# Altium footprint library W25Q128JVBIQ.PcbLib: 3 footprints
Each footprint in its own frame and in the unit in brackets; x right, y up, seen from the top. Pads: shape width x height; smd on the part's side, far side on the other; paste and mask are expansions set on the pad; w line width, h text height; cw(c..) or ccw(c..) is an arc to the next point about the centre after c.
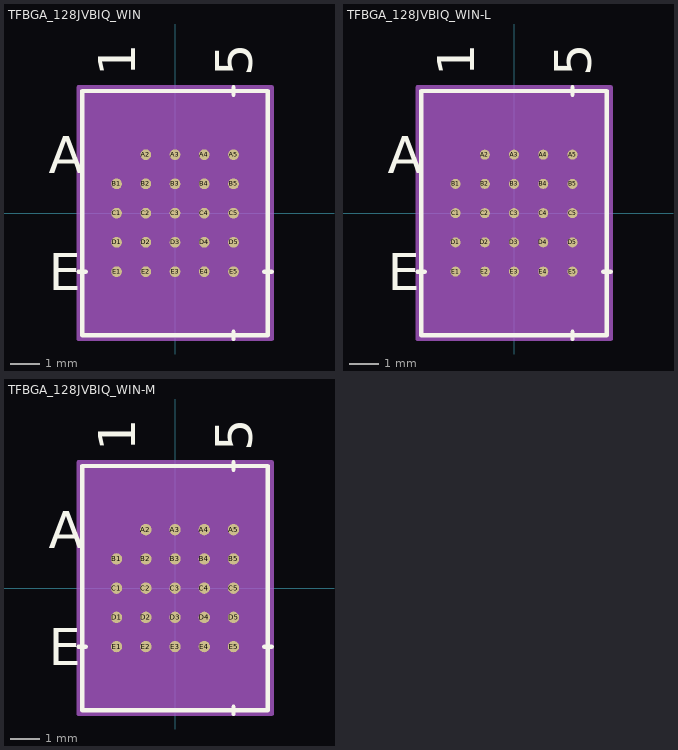
[diagram p0: the footprints below, top view; thin cyan lines are the x and y axes]

## TFBGA_128JVBIQ_WIN [mm]
pads (24):
  round 0.366 smd paste+0 mask+0: A2(-1,2) A3(0,2) A4(1,2) A5(2,2) B1(-2,1) B2(-1,1) B3(0,1) B4(1,1) B5(2,1) C1(-2,0) C2(-1,0) C3(0,0) C4(1,0) C5(2,0) D1(-2,-1) D2(-1,-1) D3(0,-1) D4(1,-1) D5(2,-1) E1(-2,-2) E2(-1,-2) E3(0,-2) E4(1,-2) E5(2,-2)
Top Overlay:
  lines w0.152: -3.302,-2 -3.048,-2 ; 2,-4.305 2,-4.051 ; 2,4.051 2,4.305 ; 3.048,-2 3.302,-2 ; -3.175,-4.178 3.175,-4.178 3.175,4.178 -3.175,4.178 -3.175,-4.178
  text "A" at -4.318,1.365 h1.27
  text "E" at -4.318,-2.635 h1.27
  text "1" at -1.365,4.686 h1.27
  text "5" at 2.635,4.686 h1.27
  text ".Designator" at -3.492,-0.635 h1.27
Bottom Overlay:
  text "A" at -3.683,1.365 h1.27
  text "E" at -3.683,-2.635 h1.27
  text "1" at -2.635,4.686 h1.27
  text "5" at 1.365,4.686 h1.27
Mechanical 13:
  lines w0.025: -3.048,3.551 -2.548,4.051 ; -3.048,-4.051 3.048,-4.051 3.048,4.051 -3.048,4.051 -3.048,-4.051
  text ".Designator" at -3.492,-0.635 h1.27
  text "A" at -4.318,1.365 h1.27
  text "E" at -4.318,-2.635 h1.27
  text "1" at -1.365,4.686 h1.27
  text "5" at 2.635,4.686 h1.27
Mechanical 15:
  region: 3.302,-4.305 -3.302,-4.305 -3.302,4.305 3.302,4.305
  lines w0.152: -3.302,-4.305 -3.302,4.305 3.302,4.305 3.302,-4.305 -3.302,-4.305
3D body "TFBGA_128JVBIQ_WIN.step": height 1.2, standoff 0, extent -3.048,-4.051 3.048,4.051

## TFBGA_128JVBIQ_WIN-L [mil]
pads (24):
  round 13.5 smd paste+0 mask+0: A2(-39.37,78.74) A3(0,78.74) A4(39.37,78.74) A5(78.74,78.74) B1(-78.74,39.37) B2(-39.37,39.37) B3(0,39.37) B4(39.37,39.37) B5(78.74,39.37) C1(-78.74,0) C2(-39.37,0) C3(0,0) C4(39.37,0) C5(78.74,0) D1(-78.74,-39.37) D2(-39.37,-39.37) D3(0,-39.37) D4(39.37,-39.37) D5(78.74,-39.37) E1(-78.74,-78.74) E2(-39.37,-78.74) E3(0,-78.74) E4(39.37,-78.74) E5(78.74,-78.74)
Top Overlay:
  lines w6: -130,-78.74 -120,-78.74 ; 78.74,-169.5 78.74,-159.5 ; 78.74,159.5 78.74,169.5 ; 120,-78.74 130,-78.74 ; -125,-164.5 125,-164.5 125,164.5 -125,164.5 -125,-164.5
  text "A" at -170,53.74 h50
  text "E" at -170,-103.74 h50
  text "1" at -53.74,184.5 h50
  text "5" at 103.74,184.5 h50
  text ".Designator" at -137.5,-25 h50
Bottom Overlay:
  text "A" at -145,53.74 h50
  text "E" at -145,-103.74 h50
  text "1" at -103.74,184.5 h50
  text "5" at 53.74,184.5 h50
Mechanical 13:
  lines w1: -120,139.81 -100.31,159.5 ; -120,-159.5 120,-159.5 120,159.5 -120,159.5 -120,-159.5
  text ".Designator" at -137.5,-25 h50
  text "A" at -170,53.74 h50
  text "E" at -170,-103.74 h50
  text "1" at -53.74,184.5 h50
  text "5" at 103.74,184.5 h50
Mechanical 15:
  region: 130,-169.5 -130,-169.5 -130,169.5 130,169.5
  lines w6: -130,-169.5 -130,169.5 130,169.5 130,-169.5 -130,-169.5
3D body "TFBGA_128JVBIQ_WIN.step": height 47.09, standoff 0.02, extent -120,-159.49 120,159.49

## TFBGA_128JVBIQ_WIN-M [mm]
pads (24):
  round 0.389 smd paste+0 mask+0: A2(-1,2) A3(0,2) A4(1,2) A5(2,2) B1(-2,1) B2(-1,1) B3(0,1) B4(1,1) B5(2,1) C1(-2,0) C2(-1,0) C3(0,0) C4(1,0) C5(2,0) D1(-2,-1) D2(-1,-1) D3(0,-1) D4(1,-1) D5(2,-1) E1(-2,-2) E2(-1,-2) E3(0,-2) E4(1,-2) E5(2,-2)
Top Overlay:
  lines w0.152: -3.302,-2 -3.048,-2 ; 2,-4.305 2,-4.051 ; 2,4.051 2,4.305 ; 3.048,-2 3.302,-2 ; -3.175,-4.178 3.175,-4.178 3.175,4.178 -3.175,4.178 -3.175,-4.178
  text "A" at -4.318,1.365 h1.27
  text "E" at -4.318,-2.635 h1.27
  text "1" at -1.365,4.686 h1.27
  text "5" at 2.635,4.686 h1.27
  text ".Designator" at -3.492,-0.635 h1.27
Bottom Overlay:
  text "A" at -3.683,1.365 h1.27
  text "E" at -3.683,-2.635 h1.27
  text "1" at -2.635,4.686 h1.27
  text "5" at 1.365,4.686 h1.27
Mechanical 13:
  lines w0.025: -3.048,3.551 -2.548,4.051 ; -3.048,-4.051 3.048,-4.051 3.048,4.051 -3.048,4.051 -3.048,-4.051
  text ".Designator" at -3.492,-0.635 h1.27
  text "A" at -4.318,1.365 h1.27
  text "E" at -4.318,-2.635 h1.27
  text "1" at -1.365,4.686 h1.27
  text "5" at 2.635,4.686 h1.27
Mechanical 15:
  region: 3.302,-4.305 -3.302,-4.305 -3.302,4.305 3.302,4.305
  lines w0.152: -3.302,-4.305 -3.302,4.305 3.302,4.305 3.302,-4.305 -3.302,-4.305
3D body "TFBGA_128JVBIQ_WIN.step": height 1.2, standoff 0, extent -3.048,-4.051 3.048,4.051